# Altium schematic symbol library MotorDriver_Schlib.SchLib: 78 symbols (part 1 of 4)
Pins are listed as number, name and electrical type; pins without a type are passive.

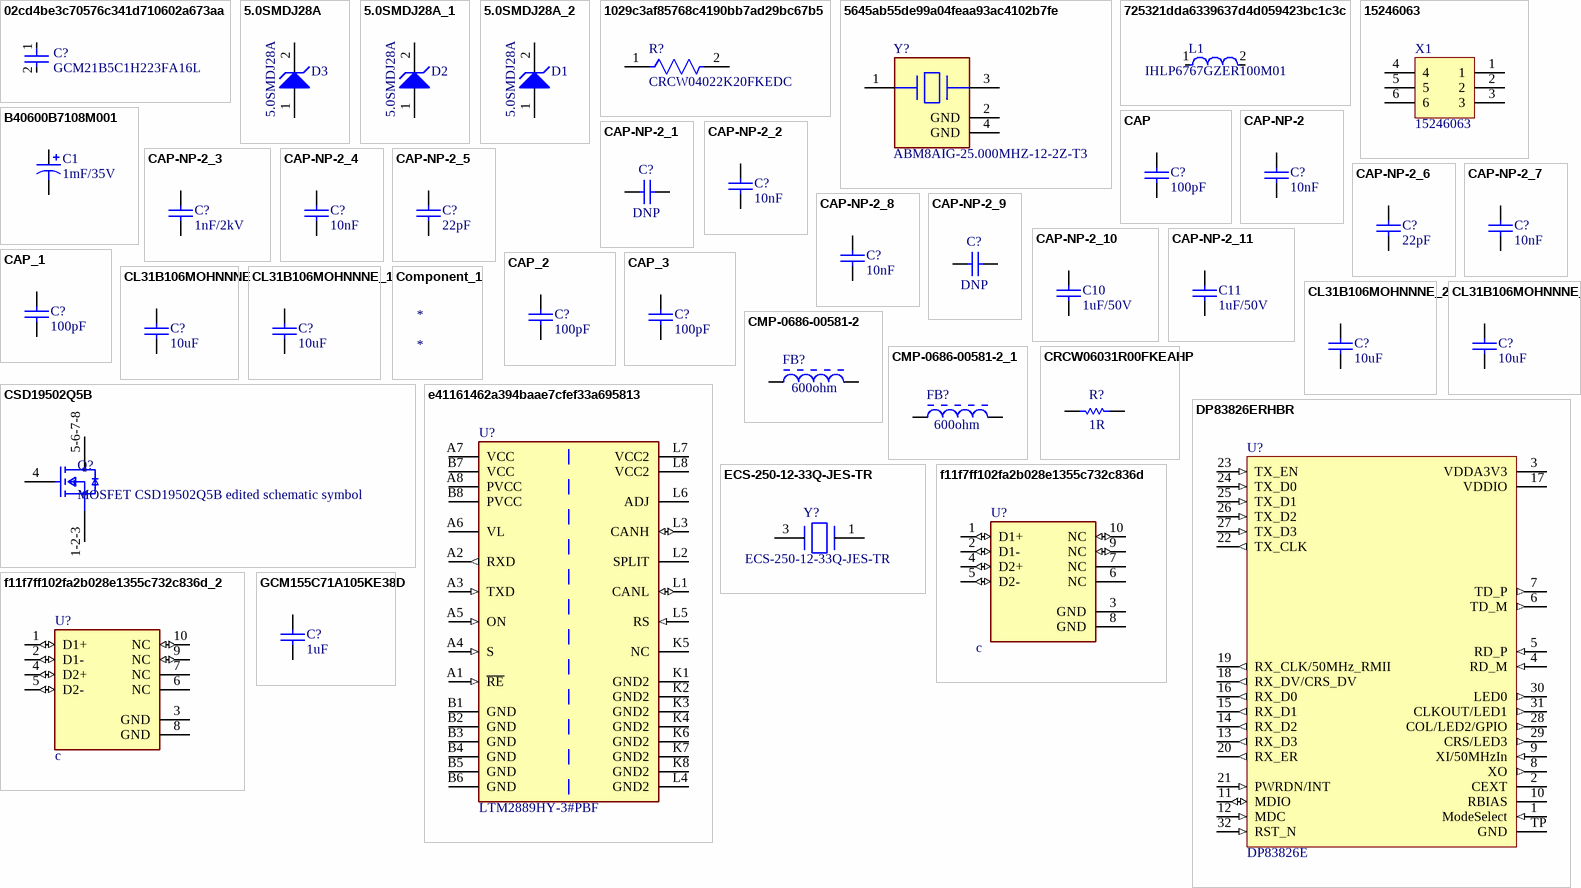
[diagram p0: symbols 02cd4be3c70576c341d710602a673aa to GCM155C71A105KE38D]

## 02cd4be3c70576c341d710602a673aa
designator C?, comment GCM21B5C1H223FA16L
Ceramic Capacitor for Automotive 22nF ±1% 50VDC C0G 0805 Embossed T/R
footprint FP-GCM21B-0_15-MFG
footprint FP-GCM21B-0_15-IPC_A
footprint FP-GCM21B-0_15-IPC_B
footprint FP-GCM21B-0_15-IPC_C
pins: 1, 2

## 5.0SMDJ28A
designator D3
5.0SMDJ Series 5 kW 28 V Uni-Directional Surface Mount TVS Diode - DO-214AB; Manufacturer: Littelfuse; ComponentLink1URL: https://datasheet.ciiva.com/15143/getdatasheetpartid-185167-15143888.pdf?src-supplier=Verical; ComponentLink1Description: https://datasheet.ciiva.com/15143/getdatasheetpartid-185167-15143888.pdf?src-supplier=Verical; ComponentLink2URL: https://datasheet.ciiva.com/332/littelfuse-tvs-diode-5-0smdj-datasheet-pdf-332914.pdf?src-supplier=Digikey; ComponentLink2Description: https://datasheet.ciiva.com/332/littelfuse-tvs-diode-5-0smdj-datasheet-pdf-332914.pdf?src-supplier=Digikey; ComponentLink3URL: https://datasheet.ciiva.com/332/littelfuse-tvs-diode-5-0smdj-datasheet-pdf-332915.pdf?src-supplier=Digikey; ComponentLink3Description: https://datasheet.ciiva.com/332/littelfuse-tvs-diode-5-0smdj-datasheet-pdf-332915.pdf?src-supplier=Digikey; ComponentLink4URL: https://datasheet.ciiva.com/332/littelfuse-tvs-diode-5-0smdj-datasheet-pdf-332916.pdf?src-supplier=Digikey; ComponentLink4Description: https://datasheet.ciiva.com/332/littelfuse-tvs-diode-5-0smdj-datasheet-pdf-332916.pdf?src-supplier=Digikey; Supplier: Digikey; Supplier Part Number: 5.0SMDJ28ADKR-ND; Manufacturer Part Number: 5.0SMDJ28A; RoHS: Yes; Category: TVS Diodes; Stock: 6790; Pricing: 1=1.65, 10=1.37, 100=1.0902, 500=0.92246, 1000=0.78269 (USD)
footprint DO-214AB,SMC (DO-214AB)
pins: 1 A, 2 K

## 5.0SMDJ28A_1
designator D2, comment 5.0SMDJ28A
5.0SMDJ Series 5 kW 28 V Uni-Directional Surface Mount TVS Diode - DO-214AB; Manufacturer: Littelfuse; ComponentLink1URL: https://datasheet.ciiva.com/15143/getdatasheetpartid-185167-15143888.pdf?src-supplier=Verical; ComponentLink1Description: https://datasheet.ciiva.com/15143/getdatasheetpartid-185167-15143888.pdf?src-supplier=Verical; ComponentLink2URL: https://datasheet.ciiva.com/332/littelfuse-tvs-diode-5-0smdj-datasheet-pdf-332914.pdf?src-supplier=Digikey; ComponentLink2Description: https://datasheet.ciiva.com/332/littelfuse-tvs-diode-5-0smdj-datasheet-pdf-332914.pdf?src-supplier=Digikey; ComponentLink3URL: https://datasheet.ciiva.com/332/littelfuse-tvs-diode-5-0smdj-datasheet-pdf-332915.pdf?src-supplier=Digikey; ComponentLink3Description: https://datasheet.ciiva.com/332/littelfuse-tvs-diode-5-0smdj-datasheet-pdf-332915.pdf?src-supplier=Digikey; ComponentLink4URL: https://datasheet.ciiva.com/332/littelfuse-tvs-diode-5-0smdj-datasheet-pdf-332916.pdf?src-supplier=Digikey; ComponentLink4Description: https://datasheet.ciiva.com/332/littelfuse-tvs-diode-5-0smdj-datasheet-pdf-332916.pdf?src-supplier=Digikey; Supplier: Digikey; Supplier Part Number: 5.0SMDJ28ADKR-ND; Manufacturer Part Number: 5.0SMDJ28A; RoHS: Yes; Category: TVS Diodes; Stock: 6790; Pricing: 1=1.65, 10=1.37, 100=1.0902, 500=0.92246, 1000=0.78269 (USD)
footprint DO-214AB,SMC (DO-214AB)
pins: 1 A, 2 K

## 5.0SMDJ28A_2
designator D1, comment 5.0SMDJ28A
5.0SMDJ Series 5 kW 28 V Uni-Directional Surface Mount TVS Diode - DO-214AB; Manufacturer: Littelfuse; ComponentLink1URL: https://datasheet.ciiva.com/15143/getdatasheetpartid-185167-15143888.pdf?src-supplier=Verical; ComponentLink1Description: https://datasheet.ciiva.com/15143/getdatasheetpartid-185167-15143888.pdf?src-supplier=Verical; ComponentLink2URL: https://datasheet.ciiva.com/332/littelfuse-tvs-diode-5-0smdj-datasheet-pdf-332914.pdf?src-supplier=Digikey; ComponentLink2Description: https://datasheet.ciiva.com/332/littelfuse-tvs-diode-5-0smdj-datasheet-pdf-332914.pdf?src-supplier=Digikey; ComponentLink3URL: https://datasheet.ciiva.com/332/littelfuse-tvs-diode-5-0smdj-datasheet-pdf-332915.pdf?src-supplier=Digikey; ComponentLink3Description: https://datasheet.ciiva.com/332/littelfuse-tvs-diode-5-0smdj-datasheet-pdf-332915.pdf?src-supplier=Digikey; ComponentLink4URL: https://datasheet.ciiva.com/332/littelfuse-tvs-diode-5-0smdj-datasheet-pdf-332916.pdf?src-supplier=Digikey; ComponentLink4Description: https://datasheet.ciiva.com/332/littelfuse-tvs-diode-5-0smdj-datasheet-pdf-332916.pdf?src-supplier=Digikey; Supplier: Digikey; Supplier Part Number: 5.0SMDJ28ADKR-ND; Manufacturer Part Number: 5.0SMDJ28A; RoHS: Yes; Category: TVS Diodes; Stock: 6790; Pricing: 1=1.65, 10=1.37, 100=1.0902, 500=0.92246, 1000=0.78269 (USD)
footprint DO-214AB,SMC (DO-214AB)
pins: 1 A, 2 K

## 1029c3af85768c4190bb7ad29bc67b5
designator R?, comment CRCW04022K20FKEDC
RES 2.2K OHM 1% 1/16W 0402; Max Power Dissipation: 63mW; Resistance: 2.2kR; Power Rating: 62.5mW; Temperature Coefficient: 100ppm/°C; RoHS Compliant: Yes; Tolerance: 1%; Case/Package: 0402; Max Operating Temperature: 155°C; Mount: Surface Mount; Case Code (Imperial): 0402; Contact Plating: Tin; Lead Free: Lead Free; Number of Terminations: 2; Min Operating Temperature: -55°C; Case Code (Metric): 1005; Resistor Type: Thick Film; Series: CRCW-C; Packaging: Cut Tape; Termination: Wraparound; Length: 1mm
footprint FP-CRCW0402-e3-IPC_B
footprint FP-CRCW0402-e3-IPC_A
footprint FP-CRCW0402-e3-MFG (Footprint not found)
footprint FP-CRCW0402-e3-IPC_C
pins: 1, 2

## 5645ab55de99a04feaa93ac4102b7fe
designator Y?, comment ABM8AIG-25.000MHZ-12-2Z-T3
Crystal 25MHz ±20ppm (Tol) ±50ppm (Stability) 12pF FUND 50Ω Automotive 4-Pin Ultra Mini-CSMD T/R; ESR (Equivalent Series Resistance): 50R; Load Capacitance: 12pF; Ratings: AEC-Q200; Frequency: 25MHz; Packaging: Cut Tape; Frequency Stability: 50ppm; Series: ABM8AIG; RoHS Compliant: Yes; Height: 0.031inch; Width: 0.098inch; Mount: Surface Mount; Length: 0.126inch; Frequency Tolerance: 20ppm; Min Operating Temperature: -40°C; Case/Package: SMD/SMT; Max Operating Temperature: 125°C
footprint FP-ABM8AIG-MFG
pins: 1, 2 GND (power), 3, 4 GND (power)

## 725321dda6339637d4d059423bc1c3c
designator L1, comment IHLP6767GZER100M01
Commercial Inductors, High Saturation Series 10uH 16.5A 12mΩ 20%; Manufacturer: Vishay; Saturation Current: 25A; Shielding: Shielded; Core Material: Metal; DC Resistance (DCR): 12mR; Test Frequency: 100kHz; Self Resonant Frequency: 2MHz; Min Operating Temperature: -55°C; RMS Current (Irms): 16.5A; Case/Package: 6767; Max DC Current: 25A; Depth: 17.15mm; Value: 10uH; Length: 17.15mm; Inductance Tolerance: 20%; Height - Seated (Max): 0.276inch; Military Standard: Not; Packaging: Tape and Reel; Package Quantity: 200; Lead Free: Lead Free; Height: 7mm; Max Operating Temperature: 125°C; Current Rating: 16.5A; Termination: SMD/SMT; Width: 0.675inch; Radiation Hardening: No; Mount: Surface Mount; Tolerance: 20%; Supplier: Digikey; Supplier Part Number: 541-1259-1-ND; Manufacturer Part Number: IHLP6767GZER100M01; RoHS: Yes; Category: Fixed Inductors; Stock: 830; Pricing: 1=4.05, 10=3.391, 25=3.0956, 50=2.6534, 100=2.4323 (USD); ComponentLink1URL: https://datasheet.ciiva.com/11801/0900766b8102c93d-11801342.pdf?src-supplier=Rs; ComponentLink1Description: https://datasheet.ciiva.com/11801/0900766b8102c93d-11801342.pdf?src-supplier=Rs; ComponentLink2URL: https://datasheet.ciiva.com/8017/482834-8017456.pdf?src-supplier=Element14; ComponentLink2Description: https://datasheet.ciiva.com/8017/482834-8017456.pdf?src-supplier=Element14; ComponentLink3URL: https://datasheet.ciiva.com/16332/lp67gz01-16332860.pdf?src-supplier=Future+Electronics; ComponentLink3Description: https://datasheet.ciiva.com/16332/lp67gz01-16332860.pdf?src-supplier=Future+Electronics; ComponentLink4URL: https://datasheet.ciiva.com/22694/482834-22694509.pdf?src-supplier=Element14; ComponentLink4Description: https://datasheet.ciiva.com/22694/482834-22694509.pdf?src-supplier=Element14
footprint FP-IHLP-6767GZ-FP_3_825x1-MFG
pins: 1, 2

## 15246063
designator X1
Conn Power HDR 6 POS 4.2mm Solder RA Thru-Hole 6 Terminal 1 Port Mini-Fit® BMI Frame; Manufacturer: Molex; Supplier: Digikey; Supplier Part Number: WM13414-ND; Manufacturer Part Number: 15-24-6063; RoHS: Yes; Category: Headers and Wire Housings; Stock: 3219; Pricing: 1=2.18, 10=1.918, 100=1.5346 (USD); ComponentLink1URL: https://datasheet.ciiva.com/6814/015246180-sd-6814098.pdf?src-supplier=Digikey; ComponentLink1Description: https://datasheet.ciiva.com/6814/015246180-sd-6814098.pdf?src-supplier=Digikey; ComponentLink2URL: https://datasheet.ciiva.com/36533/88630015246063-pcb-headers-36533167.pdf?src-supplier=Onlinecomponents.com; ComponentLink2Description: https://datasheet.ciiva.com/36533/88630015246063-pcb-headers-36533167.pdf?src-supplier=Onlinecomponents.com; ComponentLink3URL: https://datasheet.ciiva.com/3117/0015246063-pcb-headers-3117083.pdf?src-supplier=Avnet; ComponentLink3Description: https://datasheet.ciiva.com/3117/0015246063-pcb-headers-3117083.pdf?src-supplier=Avnet
footprint MOLEX_15246063
pins: 1, 2, 3, 4, 5, 6

## B40600B7108M001
designator C1, comment 1mF/35V
Hybrid Polymer Capacitors, 1000µF/35V DC, 16mm dia x 25mm length; Manufacturer: TDK EPCOS; MP: B40600B7108M001; Value: 1000uF; MF: EPCOS - TDK Electronics; SnapEDA_Link: https://www.snapeda.com/parts/B40600B7108M001/TDK/view-part/?ref=snap; Purchase-URL: https://pricing.snapeda.com/search/part/B40600B7108M001/?ref=eda; Check_prices: https://www.snapeda.com/parts/B40600B7108M001/TDK/view-part/?ref=eda; Digi-Key_Part_Number: 495-B40600B7108M001-ND; Package: AXIAL-2 TDK; Supplier: Digikey; Supplier Part Number: 495-B40600B7108M001-ND; Manufacturer Part Number: B40600B7108M001; RoHS: Yes; Category: Polymer Capacitors; Stock: 816; Pricing: 1=5.06, 10=4.354, 50=3.9488, 180=3.26022, 540=2.835, 1080=2.8125 (USD); Length: 25mm
footprint CAP_B40600B7108M001
pins: N, P

## CAP
designator C?, comment 100pF
Manufacturer: Murata; Part Number: GRM1555C1H101JA01D; Material: Ceramic; Tolerance: 5%; Voltage Rating: 50V; Dielectric: C0G; Supplier 1: Digi-Key; Supplier Part Number 1: 490-5922-1-ND; Manufacturer Part Number: GRM1555C1H101JA01D; RoHS: Yes; Category: Ceramic Capacitors; Stock 1: 8373375; Pricing 1: 1=0.10000, 10=0.02500, 100=0.01120, 500=0.00800, 1000=0.00629, 2500=0.00572, 5000=0.00526 (USD); Mount: Surface Mount; Case/Package: 0402; Case Code (Metric): 1005; Case Code (Imperial): 0402; Min Operating Temperature: -55°C; Max Operating Temperature: 125°C; Value: 100pF; Packaging: Tape and Reel; Package Quantity: 1; Voltage Rating (DC): 50V; Termination: SMD/SMT; Voltage: 50V; Length: 1mm; Height: 0.5mm; Width: 0.02inch; Thickness: 0.022inch; Depth: 0.5mm; Radiation Hardening: No; Lead Free: Lead Free; REACH SVHC: No SVHC; ComponentLink1URL: https://datasheet.ciiva.com/11786/0900766b80ef921d-11786069.pdf?src-supplier=RSComponents; ComponentLink1Description: https://datasheet.ciiva.com/11786/0900766b80ef921d-11786069.pdf?src-supplier=RSComponents; ComponentLink2URL: https://datasheet.ciiva.com/18184/getdatasheetpartid-199957-18184175.pdf?src-supplier=Verical; ComponentLink2Description: https://datasheet.ciiva.com/18184/getdatasheetpartid-199957-18184175.pdf?src-supplier=Verical; ComponentLink3URL: https://datasheet.ciiva.com/29200/453557-da-01-en-vs-kondensator-0402-29200111.pdf?src-supplier=Conrad; ComponentLink3Description: https://datasheet.ciiva.com/29200/453557-da-01-en-vs-kondensator-0402-29200111.pdf?src-supplier=Conrad; ComponentLink4URL: https://datasheet.ciiva.com/16440/product-16440566.pdf?src-supplier=Future+Electronics; ComponentLink4Description: https://datasheet.ciiva.com/16440/product-16440566.pdf?src-supplier=Future+Electronics; ComponentLink5URL: https://datasheet.ciiva.com/6271/partnumbering-e-01-6271071.pdf?src-supplier=Digi-Key; ComponentLink5Description: https://datasheet.ciiva.com/6271/partnumbering-e-01-6271071.pdf?src-supplier=Digi-Key
footprint CAPC1005X55X25ML05T10 (Chip Capacitor, 2-Leads, Body 1.00x0.50mm, IPC Low Density)
footprint CAPC1005X55X25NL05T10 (Chip Capacitor, 2-Leads, Body 1.00x0.50mm, IPC Medium Density)
footprint CAPC1005X55X25LL05T10 (Chip Capacitor, 2-Leads, Body 1.00x0.50mm, IPC High Density)
pins: 1, 2
1 alternate drawing of the same symbol

## CAP-NP-2
designator C?, comment 10nF
Chip Capacitor, 10 nF, +/- 10%, 50 V, -55 to 125 degC, 0402 (1005 Metric), RoHS, Tape and Reel; Manufacturer Part Number: GRM155R71H103KA88D; Manufacturer: Basic Passives; Case\/Package: 0402; Voltage Rating: 50 V; Type (Capacitors): X7R; DatasheetVersion: 02/2016; Value: 10nF; Mount: Surface Mount; Max Operating Temperature: 125°C; ComponentLink1Description: Manufacturer URL; Package Quantity: 10000; Mounting Technology: Surface Mount; Radiation Hardening: No; Lead Pitch: 2mm; Length: 1 mm; Tolerance: 10%; Voltage Rating (DC): 50 V; Case Code (Metric): 1005; Packaging: Tape and Reel; Pins: 2; Width: 0.5 mm; PackageDescription: 2-Pin Surface Mount Device, Body 1 x 0.5 mm; ComponentLink1URL: http://www.murata.com/; Min Operating Temperature: -55°C; Height: 0.5 mm; RoHSCompliant: true; Case Code (Imperial): 0402; ComponentLink2URL: http://search.murata.co.jp/Ceramy/image/img/A01X/G101/ENG/GRM155R71H103KA88-01.pdf; ComponentLink2Description: Datasheet; PackageReference: 0402; REACH SVHC: No SVHC
footprint CAPC1005X55X25LL05T10 (Chip Capacitor, 2-Leads, Body 1.05x0.55mm, IPC High Density)
footprint CAPC1005X55X25NL05T10 (Chip Capacitor, 2-Leads, Body 1.05x0.55mm, IPC Medium Density)
footprint CAPC1005X55X25ML05T10 (Chip Capacitor, 2-Leads, Body 1.05x0.55mm, IPC Low Density)
pins: 1, 2

## CAP-NP-2_1
designator C?, comment DNP
Chip Capacitor, 1 nF, +/- 10%, 2000 V, -55 to 125 degC, 1206 (3216 Metric), RoHS, Tape and Reel; Manufacturer: Johanson Dielectrics; Manufacturer Part Number: 202R18W102KV4E; Voltage Rating DC: 2kV; Brand: JohansonDielectrics; Case Length: 3.15mm; Type: HighVoltageCapacitors; Dielectric: X7R; Case Width: 1.6mm; Value: 1nF; Class: 2; Case Height: 1.27mm; Case Code - mm: 3216; Package / Case: 1206(3216metric); Case Code - in: 1206; Manufacturer URL: http://www.johansondielectrics.com; Tolerance: 10%; Minimum Operating Temperature: -55C; Termination Style: SMD/SMT; Datasheet Version: Apr-07; RoHS: Details; Factory Pack Quantity: 3000; Datasheet URL: http://www.farnell.com/datasheets/87135.pdf; Product Category: MultilayerCeramicCapacitorsMLCC-SMD/SMT; Maximum Operating Temperature: +125C; Product: GeneralTypeMLCCs; Packaging: Reel; Supplier 1: Digi-Key; Supplier Part Number 1: 709-1036-1-ND; Category: Ceramic Capacitors; Stock 1: 248480; Pricing 1: 1=0.24000, 10=0.16300, 50=0.10840, 100=0.09210, 500=0.06504, 1000=0.05691 (USD); Mount: Surface Mount; Case/Package: 1206; Number of Pins: 2; Case Code (Metric): 3216; Case Code (Imperial): 1206; Contact Plating: Tin; Min Operating Temperature: -55°C; Max Operating Temperature: 125°C; Capacitance: 1nF; Voltage Rating: 2kV; Package Quantity: 3000; Voltage Rating (DC): 2kV; Termination: SMD/SMT; Length: 3.17mm; Width: 0.062inch; Height: 1.27mm; Thickness: 0.067inch; Depth: 1.57mm; Radiation Hardening: No; REACH SVHC: No SVHC; ComponentLink1URL: https://datasheet.ciiva.com/24045/jdi-product-catalog-274959-24045850.pdf?src-supplier=Mouser; ComponentLink1Description: https://datasheet.ciiva.com/24045/jdi-product-catalog-274959-24045850.pdf?src-supplier=Mouser; ComponentLink2URL: https://datasheet.ciiva.com/8032/87135-8032166.pdf?src-supplier=Element14; ComponentLink2Description: https://datasheet.ciiva.com/8032/87135-8032166.pdf?src-supplier=Element14; ComponentLink3URL: https://datasheet.ciiva.com/22748/1909358-22748119.pdf?src-supplier=Element14; ComponentLink3Description: https://datasheet.ciiva.com/22748/1909358-22748119.pdf?src-supplier=Element14; ComponentLink4URL: https://datasheet.ciiva.com/22693/1909358-22693785.pdf?src-supplier=Element14; ComponentLink4Description: https://datasheet.ciiva.com/22693/1909358-22693785.pdf?src-supplier=Element14; ComponentLink5URL: https://datasheet.ciiva.com/26823/getdatasheetpartid-58645-26823036.pdf?src-supplier=Verical; ComponentLink5Description: https://datasheet.ciiva.com/26823/getdatasheetpartid-58645-26823036.pdf?src-supplier=Verical; ComponentLink6URL: https://datasheet.ciiva.com/7061/1898761-7061724.pdf?src-supplier=Newark; ComponentLink6Description: https://datasheet.ciiva.com/7061/1898761-7061724.pdf?src-supplier=Newark
footprint JD-202R18W102KV4E-2_M (Chip Capacitor, 2-Leads, Body 3.42x1.82mm, IPC Low Density)
footprint JD-202R18W102KV4E-2_N (Chip Capacitor, 2-Leads, Body 3.42x1.82mm, IPC Medium Density)
footprint JD-202R18W102KV4E-2_L (Chip Capacitor, 2-Leads, Body 3.42x1.82mm, IPC High Density)
pins: 1, 2

## CAP-NP-2_2
designator C?, comment 10nF
Chip Capacitor, 10 nF, +/- 10%, 50 V, -55 to 125 degC, 0402 (1005 Metric), RoHS, Tape and Reel; Manufacturer Part Number: GRM155R71H103KA88D; Manufacturer: Basic Passives; Case\/Package: 0402; Voltage Rating: 50 V; Type (Capacitors): X7R; DatasheetVersion: 02/2016; Value: 10nF; Mount: Surface Mount; Max Operating Temperature: 125°C; ComponentLink1Description: Manufacturer URL; Package Quantity: 10000; Mounting Technology: Surface Mount; Radiation Hardening: No; Lead Pitch: 2mm; Length: 1 mm; Tolerance: 10%; Voltage Rating (DC): 50 V; Case Code (Metric): 1005; Packaging: Tape and Reel; Pins: 2; Width: 0.5 mm; PackageDescription: 2-Pin Surface Mount Device, Body 1 x 0.5 mm; ComponentLink1URL: http://www.murata.com/; Min Operating Temperature: -55°C; Height: 0.5 mm; RoHSCompliant: true; Case Code (Imperial): 0402; ComponentLink2URL: http://search.murata.co.jp/Ceramy/image/img/A01X/G101/ENG/GRM155R71H103KA88-01.pdf; ComponentLink2Description: Datasheet; PackageReference: 0402; REACH SVHC: No SVHC
footprint CAPC1005X55X25LL05T10 (Chip Capacitor, 2-Leads, Body 1.05x0.55mm, IPC High Density)
footprint CAPC1005X55X25NL05T10 (Chip Capacitor, 2-Leads, Body 1.05x0.55mm, IPC Medium Density)
footprint CAPC1005X55X25ML05T10 (Chip Capacitor, 2-Leads, Body 1.05x0.55mm, IPC Low Density)
pins: 1, 2

## CAP-NP-2_3
designator C?, comment 1nF/2kV
Chip Capacitor, 1 nF, +/- 10%, 2000 V, -55 to 125 degC, 1206 (3216 Metric), RoHS, Tape and Reel; Manufacturer: Johanson Dielectrics; Manufacturer Part Number: 202R18W102KV4E; Voltage Rating DC: 2kV; Brand: JohansonDielectrics; Case Length: 3.15mm; Type: HighVoltageCapacitors; Dielectric: X7R; Case Width: 1.6mm; Value: 1nF; Class: 2; Case Height: 1.27mm; Case Code - mm: 3216; Package / Case: 1206(3216metric); Case Code - in: 1206; Manufacturer URL: http://www.johansondielectrics.com; Tolerance: 10%; Minimum Operating Temperature: -55C; Termination Style: SMD/SMT; Datasheet Version: Apr-07; RoHS: Details; Factory Pack Quantity: 3000; Datasheet URL: http://www.farnell.com/datasheets/87135.pdf; Product Category: MultilayerCeramicCapacitorsMLCC-SMD/SMT; Maximum Operating Temperature: +125C; Product: GeneralTypeMLCCs; Packaging: Reel; Supplier 1: Digi-Key; Supplier Part Number 1: 709-1036-1-ND; Category: Ceramic Capacitors; Stock 1: 248480; Pricing 1: 1=0.24000, 10=0.16300, 50=0.10840, 100=0.09210, 500=0.06504, 1000=0.05691 (USD); Mount: Surface Mount; Case/Package: 1206; Number of Pins: 2; Case Code (Metric): 3216; Case Code (Imperial): 1206; Contact Plating: Tin; Min Operating Temperature: -55°C; Max Operating Temperature: 125°C; Capacitance: 1nF; Voltage Rating: 2kV; Package Quantity: 3000; Voltage Rating (DC): 2kV; Termination: SMD/SMT; Length: 3.17mm; Width: 0.062inch; Height: 1.27mm; Thickness: 0.067inch; Depth: 1.57mm; Radiation Hardening: No; REACH SVHC: No SVHC; ComponentLink1URL: https://datasheet.ciiva.com/24045/jdi-product-catalog-274959-24045850.pdf?src-supplier=Mouser; ComponentLink1Description: https://datasheet.ciiva.com/24045/jdi-product-catalog-274959-24045850.pdf?src-supplier=Mouser; ComponentLink2URL: https://datasheet.ciiva.com/8032/87135-8032166.pdf?src-supplier=Element14; ComponentLink2Description: https://datasheet.ciiva.com/8032/87135-8032166.pdf?src-supplier=Element14; ComponentLink3URL: https://datasheet.ciiva.com/22748/1909358-22748119.pdf?src-supplier=Element14; ComponentLink3Description: https://datasheet.ciiva.com/22748/1909358-22748119.pdf?src-supplier=Element14; ComponentLink4URL: https://datasheet.ciiva.com/22693/1909358-22693785.pdf?src-supplier=Element14; ComponentLink4Description: https://datasheet.ciiva.com/22693/1909358-22693785.pdf?src-supplier=Element14; ComponentLink5URL: https://datasheet.ciiva.com/26823/getdatasheetpartid-58645-26823036.pdf?src-supplier=Verical; ComponentLink5Description: https://datasheet.ciiva.com/26823/getdatasheetpartid-58645-26823036.pdf?src-supplier=Verical; ComponentLink6URL: https://datasheet.ciiva.com/7061/1898761-7061724.pdf?src-supplier=Newark; ComponentLink6Description: https://datasheet.ciiva.com/7061/1898761-7061724.pdf?src-supplier=Newark
footprint JD-202R18W102KV4E-2_M (Chip Capacitor, 2-Leads, Body 3.42x1.82mm, IPC Low Density)
footprint JD-202R18W102KV4E-2_N (Chip Capacitor, 2-Leads, Body 3.42x1.82mm, IPC Medium Density)
footprint JD-202R18W102KV4E-2_L (Chip Capacitor, 2-Leads, Body 3.42x1.82mm, IPC High Density)
pins: 1, 2

## CAP-NP-2_4
designator C?, comment 10nF
Chip Capacitor, 10 nF, +/- 10%, 50 V, -55 to 125 degC, 0402 (1005 Metric), RoHS, Tape and Reel; Manufacturer Part Number: GRM155R71H103KA88D; Manufacturer: Basic Passives; Case\/Package: 0402; Voltage Rating: 50 V; Type (Capacitors): X7R; DatasheetVersion: 02/2016; Value: 10nF; Mount: Surface Mount; Max Operating Temperature: 125°C; ComponentLink1Description: Manufacturer URL; Package Quantity: 10000; Mounting Technology: Surface Mount; Radiation Hardening: No; Lead Pitch: 2mm; Length: 1 mm; Tolerance: 10%; Voltage Rating (DC): 50 V; Case Code (Metric): 1005; Packaging: Tape and Reel; Pins: 2; Width: 0.5 mm; PackageDescription: 2-Pin Surface Mount Device, Body 1 x 0.5 mm; ComponentLink1URL: http://www.murata.com/; Min Operating Temperature: -55°C; Height: 0.5 mm; RoHSCompliant: true; Case Code (Imperial): 0402; ComponentLink2URL: http://search.murata.co.jp/Ceramy/image/img/A01X/G101/ENG/GRM155R71H103KA88-01.pdf; ComponentLink2Description: Datasheet; PackageReference: 0402; REACH SVHC: No SVHC
footprint CAPC1005X55X25LL05T10 (Chip Capacitor, 2-Leads, Body 1.05x0.55mm, IPC High Density)
footprint CAPC1005X55X25NL05T10 (Chip Capacitor, 2-Leads, Body 1.05x0.55mm, IPC Medium Density)
footprint CAPC1005X55X25ML05T10 (Chip Capacitor, 2-Leads, Body 1.05x0.55mm, IPC Low Density)
pins: 1, 2

## CAP-NP-2_5
designator C?, comment 22pF
Chip Capacitor, 22 pF, +/- 5%, 50 V, -55 to 125 degC, 0402 (1005 Metric), RoHS, Tape and Reel; Manufacturer: Yageo; Manufacturer Part Number: CC0402JRNPO9BN220; Voltage Rating: 50V; Dielectric Material: Ceramic; Temperature Coefficient: 30ppm/degC; Dielectric: C0G; Insulation Resistance: 100GR; Datasheet URL: http://www.yageo.com/NewPortal/yageodocoutput?fileName=/pdf/MLCC/UPY-GP_NP0_16V-to-50V_14.pdf; Depth: 0.5mm; Number of Pins: 2; Height: 0.5mm; Min Operating Temperature: -55°C; REACH SVHC: NoSVHC; Value: 22pF; Max Operating Temperature: 125°C; Voltage Rating (DC): 50V; Composition: Ceramic; Packaging: TapeandReel; Package Quantity: 1; Package Reference: 0402; Length: 1mm; Radiation Hardening: No; Package Description: 2-Pin Surface Mount Device, Body 1 x 0.5 mm; RoHSCompliant: True; Thickness: 0.022inch; Manufacturer URL: http://www.yageo.com/; Mount: SurfaceMount; Case Code (Metric): 1005; Case/Package: 0402; Tolerance: 5%; Termination: SMD/SMT; Width: 0.02inch; Datasheet Version: Rev. 14, 07/2016; Lead Free: LeadFree; Case Code (Imperial): 0402; Supplier 1: Digi-Key; Supplier Part Number 1: 311-1018-1-ND; RoHS: Yes; Category: Ceramic Capacitors; Stock 1: 2766569; Pricing 1: 1=0.10000, 10=0.02100, 50=0.01120, 100=0.00920, 500=0.00658, 1000=0.00517, 2500=0.00470, 5000=0.00433 (USD); Series: CC; Voltage: 50V; Resistor Type: Ceramic; RoHS Compliant: Yes; ComponentLink1URL: https://datasheet.ciiva.com/143/mlccorderingcode-143986.pdf?src-supplier=Digi-Key; ComponentLink1Description: https://datasheet.ciiva.com/143/mlccorderingcode-143986.pdf?src-supplier=Digi-Key; ComponentLink2URL: https://datasheet.ciiva.com/143/mlccorderingcode-143987.pdf?src-supplier=Digi-Key; ComponentLink2Description: https://datasheet.ciiva.com/143/mlccorderingcode-143987.pdf?src-supplier=Digi-Key; ComponentLink3URL: https://datasheet.ciiva.com/143/mlccorderingcode-143988.pdf?src-supplier=Digi-Key; ComponentLink3Description: https://datasheet.ciiva.com/143/mlccorderingcode-143988.pdf?src-supplier=Digi-Key; ComponentLink4URL: https://datasheet.ciiva.com/5789/1443161-5789509.pdf?src-supplier=Farnell; ComponentLink4Description: https://datasheet.ciiva.com/5789/1443161-5789509.pdf?src-supplier=Farnell; ComponentLink5URL: https://datasheet.ciiva.com/8033/1443161-8033605.pdf?src-supplier=Element14; ComponentLink5Description: https://datasheet.ciiva.com/8033/1443161-8033605.pdf?src-supplier=Element14; ComponentLink6URL: https://datasheet.ciiva.com/16625/upy-gp-np0-16v-to-50v-8-16625509.pdf?src-supplier=Avnet+Europe; ComponentLink6Description: https://datasheet.ciiva.com/16625/upy-gp-np0-16v-to-50v-8-16625509.pdf?src-supplier=Avnet+Europe; ComponentLink7URL: https://datasheet.ciiva.com/8033/1443161-8033606.pdf?src-supplier=Element14; ComponentLink7Description: https://datasheet.ciiva.com/8033/1443161-8033606.pdf?src-supplier=Element14; ComponentLink8URL: https://datasheet.ciiva.com/7656/1132289-7656615.pdf?src-supplier=Element14; ComponentLink8Description: https://datasheet.ciiva.com/7656/1132289-7656615.pdf?src-supplier=Element14; ComponentLink9URL: https://datasheet.ciiva.com/8033/1443161-8033607.pdf?src-supplier=Element14; ComponentLink9Description: https://datasheet.ciiva.com/8033/1443161-8033607.pdf?src-supplier=Element14; ComponentLink10URL: https://datasheet.ciiva.com/5425/upy-gp-np0-16v-to-50v-8-5425483.pdf?src-supplier=Mouser; ComponentLink10Description: https://datasheet.ciiva.com/5425/upy-gp-np0-16v-to-50v-8-5425483.pdf?src-supplier=Mouser; ComponentLink11URL: https://datasheet.ciiva.com/15189/getdatasheetpartid-370074-15189117.pdf?src-supplier=Verical; ComponentLink11Description: https://datasheet.ciiva.com/15189/getdatasheetpartid-370074-15189117.pdf?src-supplier=Verical
footprint CAPC1005X55X25ML05T05 (Chip Capacitor, 2-Leads, Body 1.00x0.50mm, IPC Low Density)
footprint CAPC1005X55X25NL05T05 (Chip Capacitor, 2-Leads, Body 1.00x0.50mm, IPC Medium Density)
footprint CAPC1005X55X25LL05T05 (Chip Capacitor, 2-Leads, Body 1.00x0.50mm, IPC High Density)
pins: 1, 2

## CAP-NP-2_6
designator C?, comment 22pF
Chip Capacitor, 22 pF, +/- 5%, 50 V, -55 to 125 degC, 0402 (1005 Metric), RoHS, Tape and Reel; Manufacturer: Yageo; Manufacturer Part Number: CC0402JRNPO9BN220; Voltage Rating: 50V; Dielectric Material: Ceramic; Temperature Coefficient: 30ppm/degC; Dielectric: C0G; Insulation Resistance: 100GR; Datasheet URL: http://www.yageo.com/NewPortal/yageodocoutput?fileName=/pdf/MLCC/UPY-GP_NP0_16V-to-50V_14.pdf; Depth: 0.5mm; Number of Pins: 2; Height: 0.5mm; Min Operating Temperature: -55°C; REACH SVHC: NoSVHC; Value: 22pF; Max Operating Temperature: 125°C; Voltage Rating (DC): 50V; Composition: Ceramic; Packaging: TapeandReel; Package Quantity: 1; Package Reference: 0402; Length: 1mm; Radiation Hardening: No; Package Description: 2-Pin Surface Mount Device, Body 1 x 0.5 mm; RoHSCompliant: True; Thickness: 0.022inch; Manufacturer URL: http://www.yageo.com/; Mount: SurfaceMount; Case Code (Metric): 1005; Case/Package: 0402; Tolerance: 5%; Termination: SMD/SMT; Width: 0.02inch; Datasheet Version: Rev. 14, 07/2016; Lead Free: LeadFree; Case Code (Imperial): 0402; Supplier 1: Digi-Key; Supplier Part Number 1: 311-1018-1-ND; RoHS: Yes; Category: Ceramic Capacitors; Stock 1: 2766569; Pricing 1: 1=0.10000, 10=0.02100, 50=0.01120, 100=0.00920, 500=0.00658, 1000=0.00517, 2500=0.00470, 5000=0.00433 (USD); Series: CC; Voltage: 50V; Resistor Type: Ceramic; RoHS Compliant: Yes; ComponentLink1URL: https://datasheet.ciiva.com/143/mlccorderingcode-143986.pdf?src-supplier=Digi-Key; ComponentLink1Description: https://datasheet.ciiva.com/143/mlccorderingcode-143986.pdf?src-supplier=Digi-Key; ComponentLink2URL: https://datasheet.ciiva.com/143/mlccorderingcode-143987.pdf?src-supplier=Digi-Key; ComponentLink2Description: https://datasheet.ciiva.com/143/mlccorderingcode-143987.pdf?src-supplier=Digi-Key; ComponentLink3URL: https://datasheet.ciiva.com/143/mlccorderingcode-143988.pdf?src-supplier=Digi-Key; ComponentLink3Description: https://datasheet.ciiva.com/143/mlccorderingcode-143988.pdf?src-supplier=Digi-Key; ComponentLink4URL: https://datasheet.ciiva.com/5789/1443161-5789509.pdf?src-supplier=Farnell; ComponentLink4Description: https://datasheet.ciiva.com/5789/1443161-5789509.pdf?src-supplier=Farnell; ComponentLink5URL: https://datasheet.ciiva.com/8033/1443161-8033605.pdf?src-supplier=Element14; ComponentLink5Description: https://datasheet.ciiva.com/8033/1443161-8033605.pdf?src-supplier=Element14; ComponentLink6URL: https://datasheet.ciiva.com/16625/upy-gp-np0-16v-to-50v-8-16625509.pdf?src-supplier=Avnet+Europe; ComponentLink6Description: https://datasheet.ciiva.com/16625/upy-gp-np0-16v-to-50v-8-16625509.pdf?src-supplier=Avnet+Europe; ComponentLink7URL: https://datasheet.ciiva.com/8033/1443161-8033606.pdf?src-supplier=Element14; ComponentLink7Description: https://datasheet.ciiva.com/8033/1443161-8033606.pdf?src-supplier=Element14; ComponentLink8URL: https://datasheet.ciiva.com/7656/1132289-7656615.pdf?src-supplier=Element14; ComponentLink8Description: https://datasheet.ciiva.com/7656/1132289-7656615.pdf?src-supplier=Element14; ComponentLink9URL: https://datasheet.ciiva.com/8033/1443161-8033607.pdf?src-supplier=Element14; ComponentLink9Description: https://datasheet.ciiva.com/8033/1443161-8033607.pdf?src-supplier=Element14; ComponentLink10URL: https://datasheet.ciiva.com/5425/upy-gp-np0-16v-to-50v-8-5425483.pdf?src-supplier=Mouser; ComponentLink10Description: https://datasheet.ciiva.com/5425/upy-gp-np0-16v-to-50v-8-5425483.pdf?src-supplier=Mouser; ComponentLink11URL: https://datasheet.ciiva.com/15189/getdatasheetpartid-370074-15189117.pdf?src-supplier=Verical; ComponentLink11Description: https://datasheet.ciiva.com/15189/getdatasheetpartid-370074-15189117.pdf?src-supplier=Verical
footprint CAPC1005X55X25ML05T05 (Chip Capacitor, 2-Leads, Body 1.00x0.50mm, IPC Low Density)
footprint CAPC1005X55X25NL05T05 (Chip Capacitor, 2-Leads, Body 1.00x0.50mm, IPC Medium Density)
footprint CAPC1005X55X25LL05T05 (Chip Capacitor, 2-Leads, Body 1.00x0.50mm, IPC High Density)
pins: 1, 2

## CAP-NP-2_7
designator C?, comment 10nF
Chip Capacitor, 10 nF, +/- 10%, 50 V, -55 to 125 degC, 0402 (1005 Metric), RoHS, Tape and Reel; Manufacturer Part Number: GRM155R71H103KA88D; Manufacturer: Basic Passives; Case\/Package: 0402; Voltage Rating: 50 V; Type (Capacitors): X7R; DatasheetVersion: 02/2016; Value: 10nF; Mount: Surface Mount; Max Operating Temperature: 125°C; ComponentLink1Description: Manufacturer URL; Package Quantity: 10000; Mounting Technology: Surface Mount; Radiation Hardening: No; Lead Pitch: 2mm; Length: 1 mm; Tolerance: 10%; Voltage Rating (DC): 50 V; Case Code (Metric): 1005; Packaging: Tape and Reel; Pins: 2; Width: 0.5 mm; PackageDescription: 2-Pin Surface Mount Device, Body 1 x 0.5 mm; ComponentLink1URL: http://www.murata.com/; Min Operating Temperature: -55°C; Height: 0.5 mm; RoHSCompliant: true; Case Code (Imperial): 0402; ComponentLink2URL: http://search.murata.co.jp/Ceramy/image/img/A01X/G101/ENG/GRM155R71H103KA88-01.pdf; ComponentLink2Description: Datasheet; PackageReference: 0402; REACH SVHC: No SVHC
footprint CAPC1005X55X25LL05T10 (Chip Capacitor, 2-Leads, Body 1.05x0.55mm, IPC High Density)
footprint CAPC1005X55X25NL05T10 (Chip Capacitor, 2-Leads, Body 1.05x0.55mm, IPC Medium Density)
footprint CAPC1005X55X25ML05T10 (Chip Capacitor, 2-Leads, Body 1.05x0.55mm, IPC Low Density)
pins: 1, 2

## CAP-NP-2_8
designator C?, comment 10nF
Chip Capacitor, 10 nF, +/- 10%, 50 V, -55 to 125 degC, 0402 (1005 Metric), RoHS, Tape and Reel; Manufacturer Part Number: GRM155R71H103KA88D; Manufacturer: Basic Passives; Case\/Package: 0402; Voltage Rating: 50 V; Type (Capacitors): X7R; DatasheetVersion: 02/2016; Value: 10nF; Mount: Surface Mount; Max Operating Temperature: 125°C; ComponentLink1Description: Manufacturer URL; Package Quantity: 10000; Mounting Technology: Surface Mount; Radiation Hardening: No; Lead Pitch: 2mm; Length: 1 mm; Tolerance: 10%; Voltage Rating (DC): 50 V; Case Code (Metric): 1005; Packaging: Tape and Reel; Pins: 2; Width: 0.5 mm; PackageDescription: 2-Pin Surface Mount Device, Body 1 x 0.5 mm; ComponentLink1URL: http://www.murata.com/; Min Operating Temperature: -55°C; Height: 0.5 mm; RoHSCompliant: true; Case Code (Imperial): 0402; ComponentLink2URL: http://search.murata.co.jp/Ceramy/image/img/A01X/G101/ENG/GRM155R71H103KA88-01.pdf; ComponentLink2Description: Datasheet; PackageReference: 0402; REACH SVHC: No SVHC
footprint CAPC1005X55X25LL05T10 (Chip Capacitor, 2-Leads, Body 1.05x0.55mm, IPC High Density)
footprint CAPC1005X55X25NL05T10 (Chip Capacitor, 2-Leads, Body 1.05x0.55mm, IPC Medium Density)
footprint CAPC1005X55X25ML05T10 (Chip Capacitor, 2-Leads, Body 1.05x0.55mm, IPC Low Density)
pins: 1, 2

## CAP-NP-2_9
designator C?, comment DNP
Chip Capacitor, 1 nF, +/- 10%, 2000 V, -55 to 125 degC, 1206 (3216 Metric), RoHS, Tape and Reel; Manufacturer: Johanson Dielectrics; Manufacturer Part Number: 202R18W102KV4E; Voltage Rating DC: 2kV; Brand: JohansonDielectrics; Case Length: 3.15mm; Type: HighVoltageCapacitors; Dielectric: X7R; Case Width: 1.6mm; Value: 1nF; Class: 2; Case Height: 1.27mm; Case Code - mm: 3216; Package / Case: 1206(3216metric); Case Code - in: 1206; Manufacturer URL: http://www.johansondielectrics.com; Tolerance: 10%; Minimum Operating Temperature: -55C; Termination Style: SMD/SMT; Datasheet Version: Apr-07; RoHS: Details; Factory Pack Quantity: 3000; Datasheet URL: http://www.farnell.com/datasheets/87135.pdf; Product Category: MultilayerCeramicCapacitorsMLCC-SMD/SMT; Maximum Operating Temperature: +125C; Product: GeneralTypeMLCCs; Packaging: Reel; Supplier 1: Digi-Key; Supplier Part Number 1: 709-1036-1-ND; Category: Ceramic Capacitors; Stock 1: 248480; Pricing 1: 1=0.24000, 10=0.16300, 50=0.10840, 100=0.09210, 500=0.06504, 1000=0.05691 (USD); Mount: Surface Mount; Case/Package: 1206; Number of Pins: 2; Case Code (Metric): 3216; Case Code (Imperial): 1206; Contact Plating: Tin; Min Operating Temperature: -55°C; Max Operating Temperature: 125°C; Capacitance: 1nF; Voltage Rating: 2kV; Package Quantity: 3000; Voltage Rating (DC): 2kV; Termination: SMD/SMT; Length: 3.17mm; Width: 0.062inch; Height: 1.27mm; Thickness: 0.067inch; Depth: 1.57mm; Radiation Hardening: No; REACH SVHC: No SVHC; ComponentLink1URL: https://datasheet.ciiva.com/24045/jdi-product-catalog-274959-24045850.pdf?src-supplier=Mouser; ComponentLink1Description: https://datasheet.ciiva.com/24045/jdi-product-catalog-274959-24045850.pdf?src-supplier=Mouser; ComponentLink2URL: https://datasheet.ciiva.com/8032/87135-8032166.pdf?src-supplier=Element14; ComponentLink2Description: https://datasheet.ciiva.com/8032/87135-8032166.pdf?src-supplier=Element14; ComponentLink3URL: https://datasheet.ciiva.com/22748/1909358-22748119.pdf?src-supplier=Element14; ComponentLink3Description: https://datasheet.ciiva.com/22748/1909358-22748119.pdf?src-supplier=Element14; ComponentLink4URL: https://datasheet.ciiva.com/22693/1909358-22693785.pdf?src-supplier=Element14; ComponentLink4Description: https://datasheet.ciiva.com/22693/1909358-22693785.pdf?src-supplier=Element14; ComponentLink5URL: https://datasheet.ciiva.com/26823/getdatasheetpartid-58645-26823036.pdf?src-supplier=Verical; ComponentLink5Description: https://datasheet.ciiva.com/26823/getdatasheetpartid-58645-26823036.pdf?src-supplier=Verical; ComponentLink6URL: https://datasheet.ciiva.com/7061/1898761-7061724.pdf?src-supplier=Newark; ComponentLink6Description: https://datasheet.ciiva.com/7061/1898761-7061724.pdf?src-supplier=Newark
footprint JD-202R18W102KV4E-2_M (Chip Capacitor, 2-Leads, Body 3.42x1.82mm, IPC Low Density)
footprint JD-202R18W102KV4E-2_N (Chip Capacitor, 2-Leads, Body 3.42x1.82mm, IPC Medium Density)
footprint JD-202R18W102KV4E-2_L (Chip Capacitor, 2-Leads, Body 3.42x1.82mm, IPC High Density)
pins: 1, 2

## CAP-NP-2_10
designator C10, comment 1uF/50V
Chip Capacitor, 1 uF, +/- 10%, 50 V, -55 to 125 degC, 1206 (3216 Metric), RoHS, Tape and Reel; Manufacturer: Kemet; Manufacturer Part Number: C1206C105K5RACTU; Case Height: 1mm; Dielectric: X7R; Voltage Rating: 50V; Value: 1uF; Temperature Coefficient / Code: +/-15%; Case Length: 3.2mm; Case Width: 1.6mm; Type: SMDMLCCX7R6.3-250VDCCommericalGrade; Class: Class1; Capacitance - nF: 1000nF; Material: 4241ConductorMaterial; Dielectric Material: Ceramic; Value: 1uF; Datasheet URL: http://www.kemet.com/docfinder?Partnumber=C1206C105K5RACTU; Product Category: MultilayerCeramicCapacitorsMLCC-SMD/SMT; Termination Style: SMD/SMT; Dimensions: 1.6mmWx3.2mmLx1mmH; Voltage Rating DC: 50V; Datasheet Version: 02/2016; Packaging: Reel; Brand: Kemet; RoHS: Details; Minimum Operating Temperature: -55C; Operating Temperature Range: -55Cto+125C; Package Reference: 1206; Manufacturer URL: http://www.kemet.com/; Product: GeneralTypeMLCCs; Tolerance: 10%; Package Description: 2-Pin Surface Mount Device, Body 3.2 x 1.6 mm; Mounting Technology: SurfaceMount; Case Code - mm: 3216; Maximum Operating Temperature: +125C; Series: C1206C; Factory Pack Quantity: 2500; Package / Case: 1206(3216metric); Case Code - in: 1206; Supplier: Digikey; Supplier Part Number: 399-C1206C105K5RAC7800CT-ND; Category: Ceramic Capacitors; Stock: 273837; Pricing: 1=0.28, 10=0.182, 50=0.128, 100=0.1034, 500=0.07684, 1000=0.06724 (USD); Case/Package: 1206; Pins: 2; Case Code (Imperial): 1206; Case Code (Metric): 3216; Min Operating Temperature: -55°C; Max Operating Temperature: 125°C; Termination: SMD/SMT; Package Quantity: 1; Voltage Rating (DC): 50V; Construction: Flat; Voltage: 50V; Length: 3.2mm; Width: 0.063inch; Height: 1mm; Depth: 1.6mm; Thickness: 0.043inch; Radiation Hardening: No; RoHS Compliant: Yes; Reach SVHC Compliant: No
footprint CAPC3216X110X50LL20T25 (Chip Capacitor, 2-Leads, Body 3.20x1.60mm, IPC High Density)
footprint CAPC3216X110X50ML20T25 (Chip Capacitor, 2-Leads, Body 3.40x1.80mm, IPC Low Density)
footprint CAPC3216X110X50NL20T25 (Chip Capacitor, 2-Leads, Body 3.40x1.80mm, IPC Medium Density)
pins: 1, 2

## CAP-NP-2_11
designator C11, comment 1uF/50V
Chip Capacitor, 1 uF, +/- 10%, 50 V, -55 to 125 degC, 1206 (3216 Metric), RoHS, Tape and Reel; Manufacturer: Kemet; Manufacturer Part Number: C1206C105K5RACTU; Case Height: 1mm; Dielectric: X7R; Voltage Rating: 50V; Value: 1uF; Temperature Coefficient / Code: +/-15%; Case Length: 3.2mm; Case Width: 1.6mm; Type: SMDMLCCX7R6.3-250VDCCommericalGrade; Class: Class1; Capacitance - nF: 1000nF; Material: 4241ConductorMaterial; Dielectric Material: Ceramic; Value: 1uF; Datasheet URL: http://www.kemet.com/docfinder?Partnumber=C1206C105K5RACTU; Product Category: MultilayerCeramicCapacitorsMLCC-SMD/SMT; Termination Style: SMD/SMT; Dimensions: 1.6mmWx3.2mmLx1mmH; Voltage Rating DC: 50V; Datasheet Version: 02/2016; Packaging: Reel; Brand: Kemet; RoHS: Details; Minimum Operating Temperature: -55C; Operating Temperature Range: -55Cto+125C; Package Reference: 1206; Manufacturer URL: http://www.kemet.com/; Product: GeneralTypeMLCCs; Tolerance: 10%; Package Description: 2-Pin Surface Mount Device, Body 3.2 x 1.6 mm; Mounting Technology: SurfaceMount; Case Code - mm: 3216; Maximum Operating Temperature: +125C; Series: C1206C; Factory Pack Quantity: 2500; Package / Case: 1206(3216metric); Case Code - in: 1206; Supplier: Digikey; Supplier Part Number: 399-C1206C105K5RAC7800CT-ND; Category: Ceramic Capacitors; Stock: 273837; Pricing: 1=0.28, 10=0.182, 50=0.128, 100=0.1034, 500=0.07684, 1000=0.06724 (USD); Case/Package: 1206; Pins: 2; Case Code (Imperial): 1206; Case Code (Metric): 3216; Min Operating Temperature: -55°C; Max Operating Temperature: 125°C; Termination: SMD/SMT; Package Quantity: 1; Voltage Rating (DC): 50V; Construction: Flat; Voltage: 50V; Length: 3.2mm; Width: 0.063inch; Height: 1mm; Depth: 1.6mm; Thickness: 0.043inch; Radiation Hardening: No; RoHS Compliant: Yes; Reach SVHC Compliant: No
footprint CAPC3216X110X50LL20T25 (Chip Capacitor, 2-Leads, Body 3.20x1.60mm, IPC High Density)
footprint CAPC3216X110X50ML20T25 (Chip Capacitor, 2-Leads, Body 3.40x1.80mm, IPC Low Density)
footprint CAPC3216X110X50NL20T25 (Chip Capacitor, 2-Leads, Body 3.40x1.80mm, IPC Medium Density)
pins: 1, 2

## CAP_1
designator C?, comment 100pF
Manufacturer: Murata; Part Number: GRM1555C1H101JA01D; Material: Ceramic; Tolerance: 5%; Voltage Rating: 50V; Dielectric: C0G; Supplier 1: Digi-Key; Supplier Part Number 1: 490-5922-1-ND; Manufacturer Part Number: GRM1555C1H101JA01D; RoHS: Yes; Category: Ceramic Capacitors; Stock 1: 8373375; Pricing 1: 1=0.10000, 10=0.02500, 100=0.01120, 500=0.00800, 1000=0.00629, 2500=0.00572, 5000=0.00526 (USD); Mount: Surface Mount; Case/Package: 0402; Case Code (Metric): 1005; Case Code (Imperial): 0402; Min Operating Temperature: -55°C; Max Operating Temperature: 125°C; Value: 100pF; Packaging: Tape and Reel; Package Quantity: 1; Voltage Rating (DC): 50V; Termination: SMD/SMT; Voltage: 50V; Length: 1mm; Height: 0.5mm; Width: 0.02inch; Thickness: 0.022inch; Depth: 0.5mm; Radiation Hardening: No; Lead Free: Lead Free; REACH SVHC: No SVHC; ComponentLink1URL: https://datasheet.ciiva.com/11786/0900766b80ef921d-11786069.pdf?src-supplier=RSComponents; ComponentLink1Description: https://datasheet.ciiva.com/11786/0900766b80ef921d-11786069.pdf?src-supplier=RSComponents; ComponentLink2URL: https://datasheet.ciiva.com/18184/getdatasheetpartid-199957-18184175.pdf?src-supplier=Verical; ComponentLink2Description: https://datasheet.ciiva.com/18184/getdatasheetpartid-199957-18184175.pdf?src-supplier=Verical; ComponentLink3URL: https://datasheet.ciiva.com/29200/453557-da-01-en-vs-kondensator-0402-29200111.pdf?src-supplier=Conrad; ComponentLink3Description: https://datasheet.ciiva.com/29200/453557-da-01-en-vs-kondensator-0402-29200111.pdf?src-supplier=Conrad; ComponentLink4URL: https://datasheet.ciiva.com/16440/product-16440566.pdf?src-supplier=Future+Electronics; ComponentLink4Description: https://datasheet.ciiva.com/16440/product-16440566.pdf?src-supplier=Future+Electronics; ComponentLink5URL: https://datasheet.ciiva.com/6271/partnumbering-e-01-6271071.pdf?src-supplier=Digi-Key; ComponentLink5Description: https://datasheet.ciiva.com/6271/partnumbering-e-01-6271071.pdf?src-supplier=Digi-Key
footprint CAPC1005X55X25ML05T10 (Chip Capacitor, 2-Leads, Body 1.00x0.50mm, IPC Low Density)
footprint CAPC1005X55X25NL05T10 (Chip Capacitor, 2-Leads, Body 1.00x0.50mm, IPC Medium Density)
footprint CAPC1005X55X25LL05T10 (Chip Capacitor, 2-Leads, Body 1.00x0.50mm, IPC High Density)
pins: 1, 2
1 alternate drawing of the same symbol

## CAP_2
designator C?, comment 100pF
Manufacturer: Murata; Part Number: GRM1555C1H101JA01D; Material: Ceramic; Tolerance: 5%; Voltage Rating: 50V; Dielectric: C0G; Supplier 1: Digi-Key; Supplier Part Number 1: 490-5922-1-ND; Manufacturer Part Number: GRM1555C1H101JA01D; RoHS: Yes; Category: Ceramic Capacitors; Stock 1: 8373375; Pricing 1: 1=0.10000, 10=0.02500, 100=0.01120, 500=0.00800, 1000=0.00629, 2500=0.00572, 5000=0.00526 (USD); Mount: Surface Mount; Case/Package: 0402; Case Code (Metric): 1005; Case Code (Imperial): 0402; Min Operating Temperature: -55°C; Max Operating Temperature: 125°C; Value: 100pF; Packaging: Tape and Reel; Package Quantity: 1; Voltage Rating (DC): 50V; Termination: SMD/SMT; Voltage: 50V; Length: 1mm; Height: 0.5mm; Width: 0.02inch; Thickness: 0.022inch; Depth: 0.5mm; Radiation Hardening: No; Lead Free: Lead Free; REACH SVHC: No SVHC; ComponentLink1URL: https://datasheet.ciiva.com/11786/0900766b80ef921d-11786069.pdf?src-supplier=RSComponents; ComponentLink1Description: https://datasheet.ciiva.com/11786/0900766b80ef921d-11786069.pdf?src-supplier=RSComponents; ComponentLink2URL: https://datasheet.ciiva.com/18184/getdatasheetpartid-199957-18184175.pdf?src-supplier=Verical; ComponentLink2Description: https://datasheet.ciiva.com/18184/getdatasheetpartid-199957-18184175.pdf?src-supplier=Verical; ComponentLink3URL: https://datasheet.ciiva.com/29200/453557-da-01-en-vs-kondensator-0402-29200111.pdf?src-supplier=Conrad; ComponentLink3Description: https://datasheet.ciiva.com/29200/453557-da-01-en-vs-kondensator-0402-29200111.pdf?src-supplier=Conrad; ComponentLink4URL: https://datasheet.ciiva.com/16440/product-16440566.pdf?src-supplier=Future+Electronics; ComponentLink4Description: https://datasheet.ciiva.com/16440/product-16440566.pdf?src-supplier=Future+Electronics; ComponentLink5URL: https://datasheet.ciiva.com/6271/partnumbering-e-01-6271071.pdf?src-supplier=Digi-Key; ComponentLink5Description: https://datasheet.ciiva.com/6271/partnumbering-e-01-6271071.pdf?src-supplier=Digi-Key
footprint CAPC1005X55X25ML05T10 (Chip Capacitor, 2-Leads, Body 1.00x0.50mm, IPC Low Density)
footprint CAPC1005X55X25NL05T10 (Chip Capacitor, 2-Leads, Body 1.00x0.50mm, IPC Medium Density)
footprint CAPC1005X55X25LL05T10 (Chip Capacitor, 2-Leads, Body 1.00x0.50mm, IPC High Density)
pins: 1, 2
1 alternate drawing of the same symbol

## CAP_3
designator C?, comment 100pF
Manufacturer: Murata; Part Number: GRM1555C1H101JA01D; Material: Ceramic; Tolerance: 5%; Voltage Rating: 50V; Dielectric: C0G; Supplier 1: Digi-Key; Supplier Part Number 1: 490-5922-1-ND; Manufacturer Part Number: GRM1555C1H101JA01D; RoHS: Yes; Category: Ceramic Capacitors; Stock 1: 8373375; Pricing 1: 1=0.10000, 10=0.02500, 100=0.01120, 500=0.00800, 1000=0.00629, 2500=0.00572, 5000=0.00526 (USD); Mount: Surface Mount; Case/Package: 0402; Case Code (Metric): 1005; Case Code (Imperial): 0402; Min Operating Temperature: -55°C; Max Operating Temperature: 125°C; Value: 100pF; Packaging: Tape and Reel; Package Quantity: 1; Voltage Rating (DC): 50V; Termination: SMD/SMT; Voltage: 50V; Length: 1mm; Height: 0.5mm; Width: 0.02inch; Thickness: 0.022inch; Depth: 0.5mm; Radiation Hardening: No; Lead Free: Lead Free; REACH SVHC: No SVHC; ComponentLink1URL: https://datasheet.ciiva.com/11786/0900766b80ef921d-11786069.pdf?src-supplier=RSComponents; ComponentLink1Description: https://datasheet.ciiva.com/11786/0900766b80ef921d-11786069.pdf?src-supplier=RSComponents; ComponentLink2URL: https://datasheet.ciiva.com/18184/getdatasheetpartid-199957-18184175.pdf?src-supplier=Verical; ComponentLink2Description: https://datasheet.ciiva.com/18184/getdatasheetpartid-199957-18184175.pdf?src-supplier=Verical; ComponentLink3URL: https://datasheet.ciiva.com/29200/453557-da-01-en-vs-kondensator-0402-29200111.pdf?src-supplier=Conrad; ComponentLink3Description: https://datasheet.ciiva.com/29200/453557-da-01-en-vs-kondensator-0402-29200111.pdf?src-supplier=Conrad; ComponentLink4URL: https://datasheet.ciiva.com/16440/product-16440566.pdf?src-supplier=Future+Electronics; ComponentLink4Description: https://datasheet.ciiva.com/16440/product-16440566.pdf?src-supplier=Future+Electronics; ComponentLink5URL: https://datasheet.ciiva.com/6271/partnumbering-e-01-6271071.pdf?src-supplier=Digi-Key; ComponentLink5Description: https://datasheet.ciiva.com/6271/partnumbering-e-01-6271071.pdf?src-supplier=Digi-Key
footprint CAPC1005X55X25ML05T10 (Chip Capacitor, 2-Leads, Body 1.00x0.50mm, IPC Low Density)
footprint CAPC1005X55X25NL05T10 (Chip Capacitor, 2-Leads, Body 1.00x0.50mm, IPC Medium Density)
footprint CAPC1005X55X25LL05T10 (Chip Capacitor, 2-Leads, Body 1.00x0.50mm, IPC High Density)
pins: 1, 2
1 alternate drawing of the same symbol

## CL31B106MOHNNNE
designator C?, comment 10uF
CAP CER 10UF 16V X7R 1206; Manufacturer: Samsung; Manufacturer Part Number: CL31B106MOHNNNE; Tolerance: 20%; Supplier 1: Digi-Key; RoHS: Yes; Category: Ceramic Capacitors; Stock 1: 474394; Pricing 1: 1=0.22000, 10=0.14700, 50=0.08840, 100=0.07470, 500=0.05108, 1000=0.04519 (USD); Mount: Surface Mount; Case/Package: 1206; Case Code (Imperial): 1206; Case Code (Metric): 3216; Min Operating Temperature: -55°C; Max Operating Temperature: 125°C; Value: 10uF; Dielectric: X7R; Voltage Rating (DC): 16V; Packaging: Tape and Reel; Voltage Rating: 16V; Length: 0.126inch; Width: 0.063inch; Thickness: 0.071inch; ComponentLink1URL: http://www.samsungsem.com/kr/support/product-search/mlcc/CL31B106MOHNNNE.jsp?src-supplier=Digi-Key; ComponentLink1Description: http://www.samsungsem.com/kr/support/product-search/mlcc/CL31B106MOHNNNE.jsp?src-supplier=Digi-Key; Supplier Part Number 1: 1276-6641-1-ND
footprint FP-CL31-IPC_A
footprint FP-CL31-IPC_B
footprint FP-CL31-IPC_C
pins: 1, 2

## CL31B106MOHNNNE_1
designator C?, comment 10uF
CAP CER 10UF 16V X7R 1206; Manufacturer: Samsung; Manufacturer Part Number: CL31B106MOHNNNE; Tolerance: 20%; Supplier 1: Digi-Key; RoHS: Yes; Category: Ceramic Capacitors; Stock 1: 474394; Pricing 1: 1=0.22000, 10=0.14700, 50=0.08840, 100=0.07470, 500=0.05108, 1000=0.04519 (USD); Mount: Surface Mount; Case/Package: 1206; Case Code (Imperial): 1206; Case Code (Metric): 3216; Min Operating Temperature: -55°C; Max Operating Temperature: 125°C; Value: 10uF; Dielectric: X7R; Voltage Rating (DC): 16V; Packaging: Tape and Reel; Voltage Rating: 16V; Length: 0.126inch; Width: 0.063inch; Thickness: 0.071inch; ComponentLink1URL: http://www.samsungsem.com/kr/support/product-search/mlcc/CL31B106MOHNNNE.jsp?src-supplier=Digi-Key; ComponentLink1Description: http://www.samsungsem.com/kr/support/product-search/mlcc/CL31B106MOHNNNE.jsp?src-supplier=Digi-Key; Supplier Part Number 1: 1276-6641-1-ND
footprint FP-CL31-IPC_A
footprint FP-CL31-IPC_B
footprint FP-CL31-IPC_C
pins: 1, 2